# EAGLE library part BLUEPILL_GD32F103C8T6 (library AutoBath)
Blue Pill GD32F103C8T6 module (pin names carry this project's pin roles)
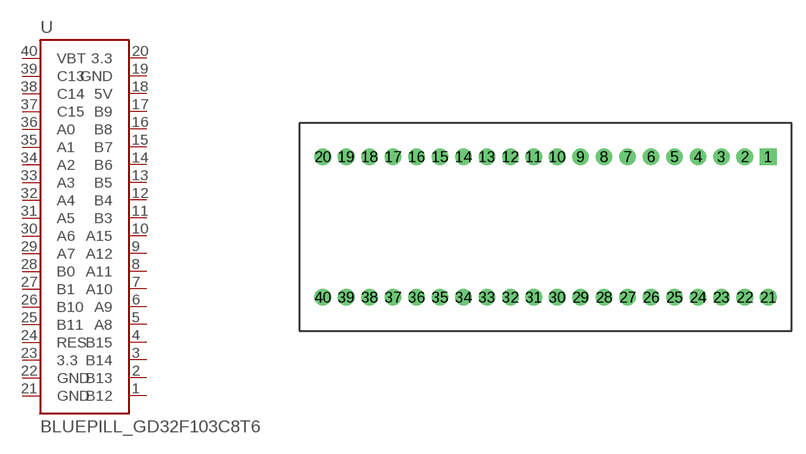
[diagram p0: symbol with the pads of BLUEPILL_40P; footprint BLUEPILL_40P]

Designator prefix U

## BLUEPILL_GD32F103C8T6  [BLUEPILL_40P]
1  B12  pas
2  B13  pas
3  B14  pas
4  B15  pas
5  A8  pas
6  A9  pas
7  A10  pas
8  A11  pas
9  A12  pas
10  A15  pas
11  B3  pas
12  B4  pas
13  B5  pas
14  B6  pas
15  B7  pas
16  B8  pas
17  B9  pas
18  5V  pas
19  GND  pas
20  3.3  pas
21  GND​  pas
22  GND​​  pas
23  3.3​  pas
24  RES  pas
25  B11  pas
26  B10  pas
27  B1  pas
28  B0  pas
29  A7  pas
30  A6  pas
31  A5  pas
32  A4  pas
33  A3  pas
34  A2  pas
35  A1  pas
36  A0  pas
37  C15  pas
38  C14  pas
39  C13  pas
40  VBT  pas

## Footprint BLUEPILL_40P (pad centres in mm)
Blue Pill module 53.34 x 22.5 mm, rows 15.24 mm apart (measured from a photo, check yours)
drill 1 pad 1.8 square: 1 24.13,7.62
drill 1 pad 1.8 round: 2 21.59,7.62; 3 19.05,7.62; 4 16.51,7.62; 5 13.97,7.62; 6 11.43,7.62; 7 8.89,7.62; 8 6.35,7.62; 9 3.81,7.62; 10 1.27,7.62; 11 -1.27,7.62; 12 -3.81,7.62; 13 -6.35,7.62; 14 -8.89,7.62; 15 -11.43,7.62; 16 -13.97,7.62; 17 -16.51,7.62; 18 -19.05,7.62; 19 -21.59,7.62; 20 -24.13,7.62; 21 24.13,-7.62; 22 21.59,-7.62; 23 19.05,-7.62; 24 16.51,-7.62; 25 13.97,-7.62; 26 11.43,-7.62; 27 8.89,-7.62; 28 6.35,-7.62; 29 3.81,-7.62; 30 1.27,-7.62; 31 -1.27,-7.62; 32 -3.81,-7.62; 33 -6.35,-7.62; 34 -8.89,-7.62; 35 -11.43,-7.62; 36 -13.97,-7.62; 37 -16.51,-7.62; 38 -19.05,-7.62; 39 -21.59,-7.62; 40 -24.13,-7.62